# Altium footprint library PCB_ConnectorFFC.PcbLib: 4 footprints
Each footprint in its own frame and in the unit in brackets; x right, y up, seen from the top. Pads: shape width x height; smd on the part's side, far side on the other; paste and mask are expansions set on the pad; w line width, h text height; cw(c..) or ccw(c..) is an arc to the next point about the centre after c.
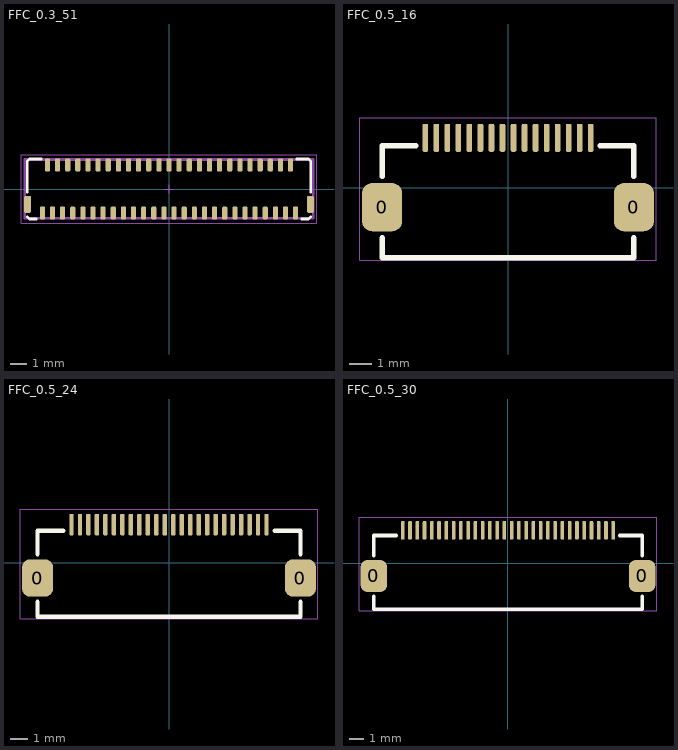
[diagram p0: the footprints below, top view; thin cyan lines are the x and y axes]

## FFC_0.3_51 [mil]
height 78.74
pads (53):
  rrect50% 16x40 smd: 0(-329.73,-36) 0(329.73,-36)
  rrect50% 12x30 smd: 1(295.27,-56) 2(283.46,56) 3(271.65,-56) 4(259.84,56) 5(248.03,-56) 6(236.22,56) 7(224.41,-56) 8(212.6,56) 9(200.79,-56) 10(188.98,56) 11(177.16,-56) 12(165.35,56) 13(153.54,-56) 14(141.73,56) 15(129.92,-56.19) 16(118.11,56) 17(106.3,-56) 18(94.49,56) 19(82.68,-56) 20(70.87,56) 21(59.05,-56) 22(47.24,56) 23(35.43,-56) 24(23.62,56) 25(11.81,-56) 26(0,56) 27(-11.81,-56) 28(-23.62,56) 29(-35.43,-56) 30(-47.24,56) 31(-59.05,-56) 32(-70.87,56) 33(-82.68,-56) 34(-94.49,56) 35(-106.3,-56) 36(-118.11,56) 37(-129.92,-56) 38(-141.73,56) 39(-153.54,-56) 40(-165.35,56) 41(-177.16,-56) 42(-188.98,56) 43(-200.79,-56) 44(-212.6,56) 45(-224.41,-56) 46(-236.22,56) 47(-248.03,-56) 48(-259.84,56) 49(-271.65,-56) 50(-283.46,56) 51(-295.27,-56)
Top Overlay:
  lines w6: -330,-65 -325,-70 -310,-70 ; -330,-7 -330,64.72 ; -330,65 -325,70 -298,70 ; 298,70 325,70 330,65 ; 310,-70 325,-70 330,-65 ; 330,-7 330,64.72
Mechanical 13:
  lines w2: -10,0 10,0 ; 0,-10 0,10
  lines w6: -336.6,-68.55 336.62,-68.55 336.62,68.85 -336.6,68.85 -336.6,-68.55
T-Component:
  lines w2: -345,-80 345,-80 345,80 -345,80 -345,-80
  text ".Designator" at -31,-20 h80
3D body "10061122511420hlf.stp": height 35.43, standoff 0, extent -336.6,-68.55 336.62,68.85

## FFC_0.5_16 [mil]
height 78.74
pads (18):
  rrect50% 72x86 smd: 0(-225,-35) 0(225,-35)
  rrect50% 10x50 smd: 1(-147.64,89) 2(-127.95,89) 3(-108.27,89) 4(-88.58,89) 5(-68.9,89) 6(-49.21,89) 7(-29.53,89) 8(-9.84,89) 9(9.84,89) 10(29.53,89) 11(49.21,89) 12(68.9,89) 13(88.58,89) 14(108.27,89) 15(127.95,89) 16(147.64,89)
Top Overlay:
  lines w10: -225,-90 -225,-125 225,-125 225,-90 ; -225,20 -225,75 -165,75 ; 165,75 225,75 225,20
T-Component:
  lines w2: -265,-130 265,-130 265,125 -265,125 -265,-130
  text ".Designator" at -31,-20 h80
3D body "ffc_fpc_affc20-16-050-shb-t.stp": height 81.71, standoff -1.16, extent -265.75,-130.07 265.75,80

## FFC_0.5_24 [mm]
height 2
pads (26):
  rrect50% 1.829x2.184 smd: 0(-7.747,-0.889) 0(7.747,-0.889)
  rrect50% 0.254x1.27 smd: 1(-5.75,2.26) 2(-5.25,2.26) 3(-4.75,2.26) 4(-4.25,2.26) 5(-3.75,2.26) 6(-3.25,2.26) 7(-2.75,2.26) 8(-2.25,2.26) 9(-1.75,2.26) 10(-1.25,2.26) 11(-0.75,2.26) 12(-0.25,2.26) 13(0.25,2.26) 14(0.75,2.26) 15(1.25,2.26) 16(1.75,2.26) 17(2.25,2.26) 18(2.75,2.26) 19(3.25,2.26) 20(3.75,2.26) 21(4.25,2.26) 22(4.75,2.26) 23(5.25,2.26) 24(5.75,2.26)
Top Overlay:
  lines w0.254: -7.747,-2.286 -7.747,-3.175 7.747,-3.175 7.747,-2.286 ; -7.747,0.508 -7.747,1.905 -6.223,1.905 ; 6.223,1.905 7.747,1.905 7.747,0.508
T-Component:
  lines w0.051: -8.763,-3.302 -8.763,3.175 8.763,3.175 8.763,-3.302 -8.763,-3.302
  text ".Designator" at -0.787,-0.508 h2.03
3D body "ffc_fpc_affc20-24-050-shb-t.stp": height 2.08, standoff -0.03, extent -8.75,-3.294 8.75,2.042

## FFC_0.5_30 [mm]
height 2
pads (32):
  rrect50% 1.829x2.184 smd: 0(-9.247,-0.889) 0(9.247,-0.889)
  rrect50% 0.254x1.27 smd: 1(-7.25,2.26) 2(-6.75,2.26) 3(-6.25,2.26) 4(-5.75,2.26) 5(-5.25,2.26) 6(-4.75,2.26) 7(-4.25,2.26) 8(-3.75,2.26) 9(-3.25,2.26) 10(-2.75,2.26) 11(-2.25,2.26) 12(-1.75,2.26) 13(-1.25,2.26) 14(-0.75,2.26) 15(-0.25,2.26) 16(0.25,2.26) 17(0.75,2.26) 18(1.25,2.26) 19(1.75,2.26) 20(2.25,2.26) 21(2.75,2.26) 22(3.25,2.26) 23(3.75,2.26) 24(4.25,2.26) 25(4.75,2.26) 26(5.25,2.26) 27(5.75,2.26) 28(6.25,2.26) 29(6.75,2.26) 30(7.25,2.26)
Top Overlay:
  lines w0.254: -9.247,-2.286 -9.247,-3.175 9.247,-3.175 9.247,-2.286 ; -9.247,0.508 -9.247,1.905 -7.723,1.905 ; 7.723,1.905 9.247,1.905 9.247,0.508
T-Component:
  lines w0.051: -10.263,-3.302 -10.263,3.175 10.263,3.175 10.263,-3.302 -10.263,-3.302
  text ".Designator" at -0.787,-0.508 h2.03